# Altium footprint library CHIP-Library.PcbLib: 345 footprints (part 12 of 22)
Each footprint in its own frame and in the unit in brackets; x right, y up, seen from the top. Pads: shape width x height; smd on the part's side, far side on the other; paste and mask are expansions set on the pad; w line width, h text height; cw(c..) or ccw(c..) is an arc to the next point about the centre after c.
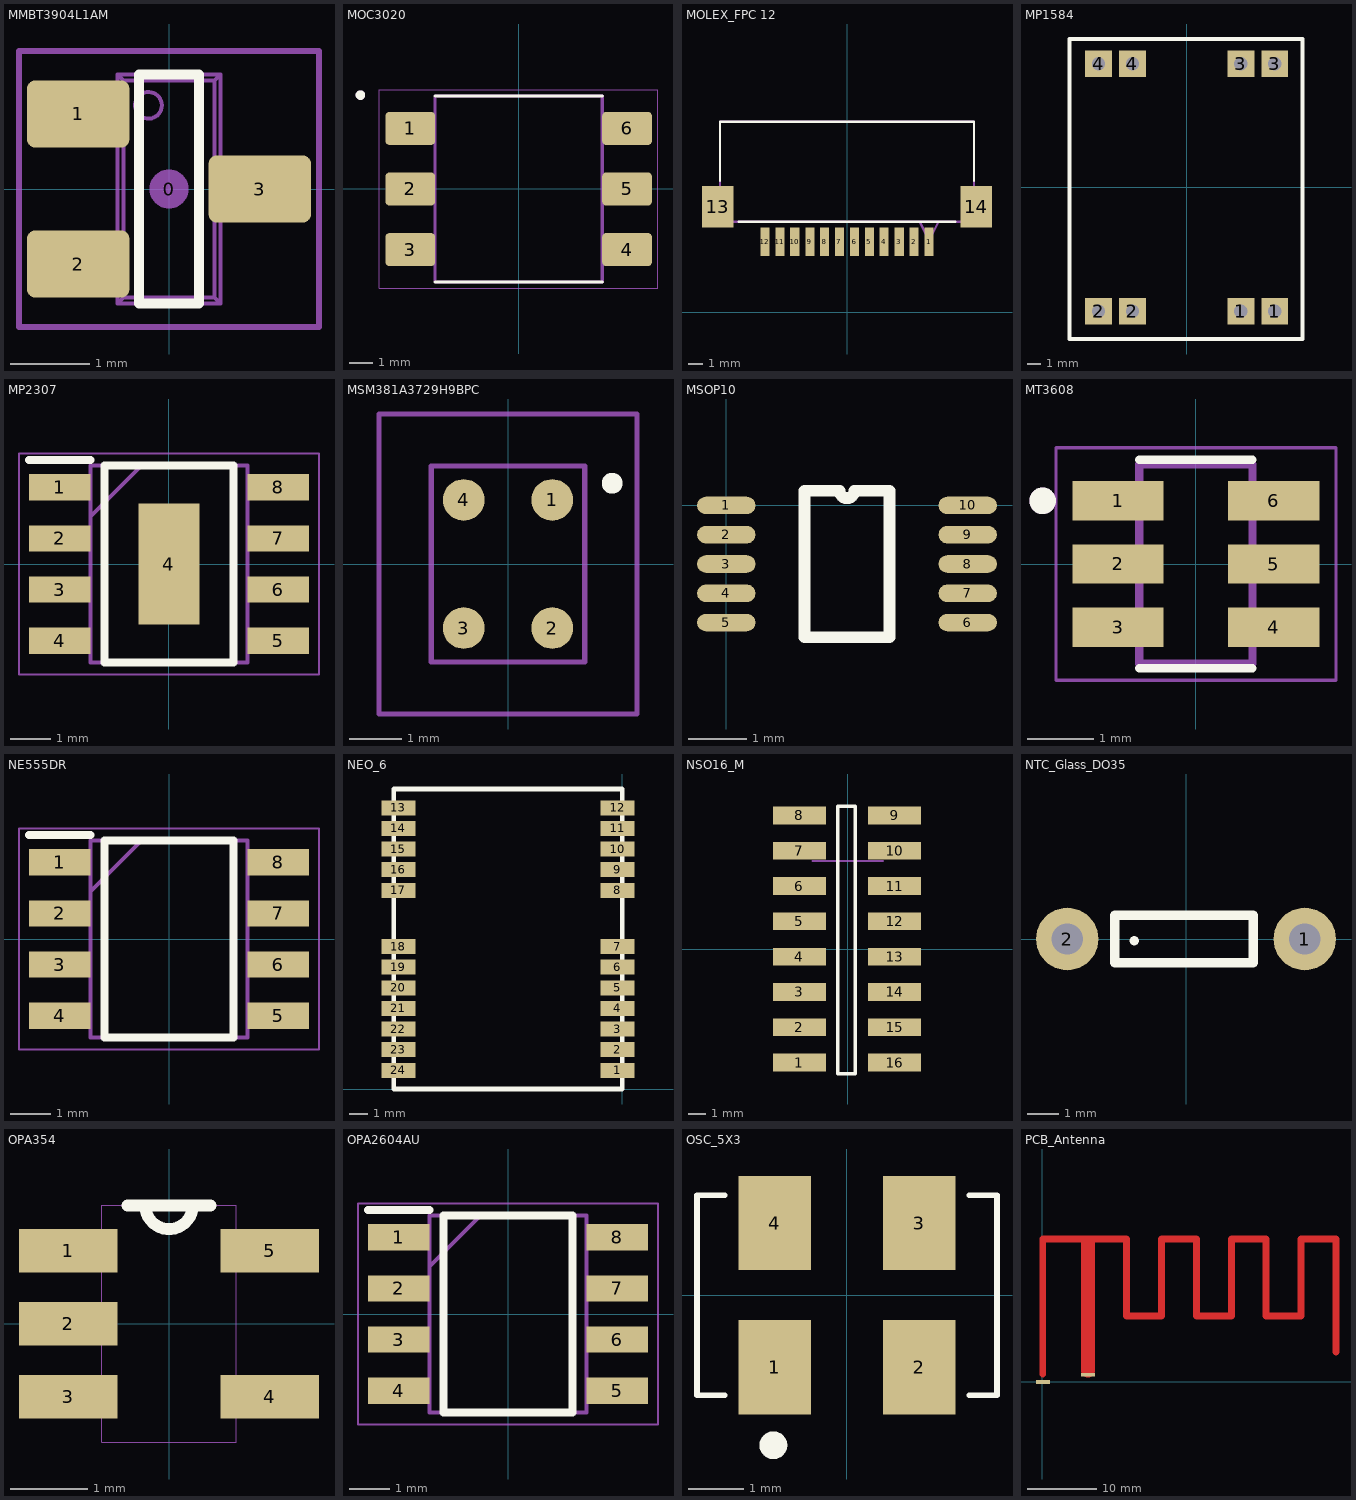
[diagram p11: the footprints below, top view; thin cyan lines are the x and y axes]

## MMBT3904L1AM [mm] "BJT TRANSISTOR SOT23, 3 pin"
height 1.003
pads (4):
  round 0.5 on Mech15: 0(0,0)
  rrect25% 1.3x0.85 smd: 1(-1.15,0.95) 2(-1.15,-0.95) 3(1.15,0)
Top Overlay:
  lines w0.127: -0.381,-1.45 -0.381,1.45 0.381,1.45 0.381,-1.45 -0.381,-1.45
  text "." at -2.125,0.95 h1.4
Mechanical 13:
  circle w0.05: c-0.26,1.06 r0.169
  lines w0.05: -1.19,-1.19 -1.19,-0.71 ; -1.19,0.71 -1.19,1.19 ; -1.099,-1.19 -1.099,-0.71 ; -1.099,0.71 -1.099,1.19 ; -1.074,-1.19 -1.074,-0.71 ; -1.074,0.71 -1.074,1.19 ; -0.825,-1.19 -0.825,-0.71 ; -0.825,0.71 -0.825,1.19 ; -0.65,-1.19 -1.4,-1.19 -1.4,-0.71 -0.65,-0.71 ; -0.65,0.71 -1.4,0.71 -1.4,1.19 -0.65,1.19 ; 0.65,-0.24 1.4,-0.24 1.4,0.24 0.65,0.24 ; 0.825,-0.24 0.825,0.24 ; 1.074,-0.24 1.074,0.24 ; 1.099,-0.24 1.099,0.24 ; 1.19,-0.24 1.19,0.24 ; -0.65,-1.45 0.65,-1.45 ; -0.65,-1.45 -0.65,1.45 ; -0.65,-1.45 -0.576,-1.376 ; -0.65,1.45 -0.576,1.376 ; -0.65,1.45 0.65,1.45 ; -0.576,-1.376 0.576,-1.376 ; -0.576,-1.376 -0.576,1.376 ; -0.576,1.376 0.576,1.376 ; 0.576,-1.376 0.65,-1.45 ; 0.576,-1.376 0.576,1.376 ; 0.576,1.376 0.65,1.45 ; 0.65,-1.45 0.65,1.45
Mechanical 15:
  lines w0.076: -1.9,-1.75 -1.9,1.75 1.9,1.75 1.9,-1.75 -1.9,-1.75
3D body "SOT23-3.STEP": height 1.29, standoff -0.01, extent -1.4,-1.45 1.4,1.45

## MOC3020 [mm]
pads (6):
  rrect25% 2.09x1.39 smd: 1(-4.54,2.54) 2(-4.54,0) 3(-4.54,-2.54) 4(4.54,-2.54) 5(4.54,0) 6(4.54,2.54)
Top Overlay:
  circle w0.2: c-6.63,3.93 r0.1
  lines w0.127: -3.5,-3.9 3.5,-3.9 ; -3.5,3.9 3.5,3.9
Mechanical 13:
  circle w0.2: c-6.63,3.93 r0.1
  lines w0.127: -3.5,-3.9 -3.5,3.9 3.5,3.9 3.5,-3.9 -3.5,-3.9
Mechanical 15:
  lines w0.05: -5.835,-4.15 -5.835,4.15 5.835,4.15 5.835,-4.15 -5.835,-4.15
3D body "IL4118-X009T.STEP": height 4.2, standoff -0.05, extent -4.773,-3.8 5.027,3.8

## MOLEX_FPC 12 [mil]
pads (14):
  rect 24x75 smd: 1(217,185) 2(177,185) 3(138,185) 4(98,185) 5(59,185) 6(20,185) 7(-20,185) 8(-59,185) 9(-98,185) 10(-138,185) 11(-177,185) 12(-217,185)
  rect 83x110 smd: 13(-341,278) 14(341,278)
Top Overlay:
  lines w6: -335,346 -335,502 335,502 335,346 ; -286,238 286,238
Mechanical 4:
  lines w6: -335,238 335,238 ; -335,238 -335,502 ; -335,238 335,238 ; -335,238 -335,502 ; -335,502 335,502 ; -335,502 335,502 ; 217,188 242,238 217,188 ; 217,188 192,238 217,188 ; 335,238 335,502 ; 335,238 335,502

## MP1584 [mm]
height 10.95
pads (8):
  rect 2x2 hole 1: 1(4.064,-9.271) 1(6.604,-9.271) 2(-6.604,-9.271) 2(-4.064,-9.271) 3(4.064,9.271) 3(6.604,9.271) 4(-6.604,9.271) 4(-4.064,9.271)
Top Overlay:
  lines w0.3: -8.788,-11.354 8.687,-11.354 8.687,11.125 -8.788,11.125 -8.788,-11.354
3D body "User Library-PCB_REG.STEP": height 6.26, standoff 2.59, extent -8.551,-11.1 8.449,10.9

## MP2307 [mm] "SOIC8"
pads (9):
  rect 1.525x0.65 smd: 1(-2.712,1.905) 2(-2.712,0.635) 3(-2.712,-0.635) 4(-2.712,-1.905) 5(2.712,-1.905) 6(2.712,-0.635) 7(2.712,0.635) 8(2.712,1.905)
  rect 1.525x3 smd paste-2: 4(0,0)
Top Overlay:
  lines w0.2: -3.475,2.58 -1.95,2.58 ; -1.6,-2.45 -1.6,2.45 1.6,2.45 1.6,-2.45 -1.6,-2.45
Top Paste:
  rectangle: -0.45,0.6 0.45,1.2
  rectangle: -0.45,-1.25 0.45,-0.65
  rectangle: -0.45,-0.3 0.45,0.3
Mechanical 13:
  lines w0.1: -1.95,1.18 -0.68,2.45 ; -1.95,-2.45 -1.95,2.45 1.95,2.45 1.95,-2.45 -1.95,-2.45
Mechanical 15:
  lines w0.05: -3.725,-2.75 -3.725,2.75 3.725,2.75 3.725,-2.75 -3.725,-2.75
3D body "FR9886SOGTR.stp": height 1.75, standoff 0, extent -3,-2.45 3,2.45

## MSM381A3729H9BPC [mm]
pads (4):
  round 0.8 smd: 1(0.85,1.23) 2(0.85,-1.23) 3(-0.85,-1.23) 4(-0.85,1.23)
Top Overlay:
  lines w0.3: 2,1.5 cw(c2,1.55) 2,1.6 cw(c2,1.55) 2,1.5
Mechanical 15:
  lines w0.1: -1.475,-1.88 1.475,-1.88 1.475,1.88 -1.475,1.88 -1.475,-1.88
Mechanical 20:
  lines w0.1: -2.475,-2.88 2.475,-2.88 2.475,2.88 -2.475,2.88 -2.475,-2.88
3D body "MSM381A3729H9BPC.stp": height 1.3, standoff 0, extent -1.475,-1.88 1.475,1.88

## MSOP10 [mm] "MSOP 10 pitch 0.5mm"
pads (10):
  oval 1x0.3 smd: 1(0,0) 2(0,-0.5) 3(0,-1) 4(0,-1.5) 5(0,-2) 6(4.125,-2) 7(4.125,-1.5) 8(4.125,-1) 9(4.125,-0.5) 10(4.125,0)
Top Overlay:
  lines w0.2: 1.335,-2.25 1.335,0.25 1.938,0.25 ccw(c2.063,0.25) 2.187,0.25 2.79,0.25 2.79,-2.25 1.335,-2.25

## MT3608 [mm]
pads (6):
  rect 1.37x0.59 smd: 1(-1.17,0.95) 2(-1.17,0) 3(-1.17,-0.95) 4(1.17,-0.95) 5(1.17,0) 6(1.17,0.95)
Top Overlay:
  circle w0.2: c-2.305,0.95 r0.1
  lines w0.127: -0.85,-1.565 0.85,-1.565 ; -0.85,1.565 0.85,1.565
Mechanical 4:
  circle w0.2: c-2.305,0.95 r0.1
  circle w0.2: c-2.305,0.95 r0.1
  lines w0.127: -0.85,-1.5 -0.85,1.5 ; -0.85,-1.5 0.85,-1.5 ; -0.85,-1.5 -0.85,1.5 ; -0.85,-1.5 0.85,-1.5 ; -0.85,1.5 0.85,1.5 ; -0.85,1.5 0.85,1.5 ; 0.85,-1.5 0.85,1.5 ; 0.85,-1.5 0.85,1.5
Mechanical 16:
  lines w0.05: -2.105,-1.75 -2.105,1.75 2.105,1.75 2.105,-1.75 -2.105,-1.75
3D body "MT3608--3DModel-STEP-56544.STEP": height 1.45, standoff 0, extent -1.4,-1.45 1.4,1.45

## NE555DR [mm]
pads (8):
  rect 1.525x0.65 smd: 1(-2.712,1.905) 2(-2.712,0.635) 3(-2.712,-0.635) 4(-2.712,-1.905) 5(2.712,-1.905) 6(2.712,-0.635) 7(2.712,0.635) 8(2.712,1.905)
Top Overlay:
  lines w0.2: -3.475,2.58 -1.95,2.58 ; -1.6,-2.45 -1.6,2.45 1.6,2.45 1.6,-2.45 -1.6,-2.45
Mechanical 13:
  lines w0.1: -1.95,1.18 -0.68,2.45 ; -1.95,-2.45 -1.95,2.45 1.95,2.45 1.95,-2.45 -1.95,-2.45
Mechanical 15:
  lines w0.05: -3.725,-2.75 -3.725,2.75 3.725,2.75 3.725,-2.75 -3.725,-2.75
3D body "NE555DR.stp": height 1.75, standoff 0, extent -3,-2.45 3,2.45

## NEO_6 [mm]
pads (24):
  rect 1.8x0.8 smd: 1(-0.254,1) 2(-0.254,2.1) 3(-0.254,3.2) 4(-0.254,4.3) 5(-0.254,5.4) 6(-0.254,6.5) 7(-0.254,7.6) 8(-0.254,10.6) 9(-0.254,11.7) 10(-0.254,12.8) 11(-0.254,13.9) 12(-0.254,15) 13(-11.938,15) 14(-11.938,13.9) 15(-11.938,12.8) 16(-11.938,11.7) 17(-11.938,10.6) 18(-11.938,7.6) 19(-11.938,6.5) 20(-11.938,5.4) 21(-11.938,4.3) 22(-11.938,3.2) 23(-11.938,2.1) 24(-11.938,1)
Top Overlay:
  lines w0.254: -12.192,0 0,0 0,16.002 -12.192,16.002 -12.192,0

## NSO16_M [mm] "SOIC, 16-Leads, Body 9.9x3.9mm, Pitch 1.27mm, IPC Low Density"
height 22
pads (16):
  rect 3x1 smd: 1(-2.75,-6.425) 2(-2.75,-4.425) 3(-2.75,-2.425) 4(-2.75,-0.425) 5(-2.75,1.575) 6(-2.75,3.575) 7(-2.75,5.575) 8(-2.75,7.575) 9(2.65,7.575) 10(2.65,5.575) 11(2.65,3.575) 12(2.65,1.575) 13(2.65,-0.425) 14(2.65,-2.425) 15(2.65,-4.425) 16(2.65,-6.425)
Top Overlay:
  lines w0.2: -0.575,-7.05 0.425,-7.05 0.425,8.1 -0.575,8.1 -0.575,-7.05
Mechanical 13:
  lines w0.1: -2,5 2,5

## NTC_Glass_DO35 [mm]
pads (2):
  round 2 hole 1: 1(3.8,0) 2(-3.8,0)
Top Overlay:
  lines w0.305: -2.286,-0.762 -2.286,0.762 2.159,0.762 2.159,-0.762 -2.286,-0.762 ; -1.651,-0.063 -1.651,-0.063
3D body "User Library-DO-35_300mils.STEP": height 2.46, standoff -2, extent -4.07,-1.016 4.07,0.89

## OPA354 [mil]
pads (5):
  rect 50x22 smd: 1(-51,37) 2(-51,0) 3(-51,-37) 4(51,-37) 5(51,37)
Top Overlay:
  lines w6: -21,60 -12,60 ; 21,60 12,60 ; -12,60 ccw(c0,60) 12,60 ; -12,60 12,60
Mechanical 4:
  lines w0: -59,-47 -59,-28 ; -59,-47 -34,-47 ; -59,-47 -59,-28 ; -59,-47 -34,-47 ; -59,-28 -34,-28 ; -59,-28 -34,-28 ; -59,-10 -59,10 ; -59,-10 -34,-10 ; -59,-10 -59,10 ; -59,-10 -34,-10 ; -59,10 -34,10 ; -59,10 -34,10 ; -59,28 -59,47 ; -59,28 -34,28 ; -59,28 -59,47 ; -59,28 -34,28 ; -59,47 -34,47 ; -59,47 -34,47 ; -34,-60 34,-60 ; -34,-60 -34,-47 ; -34,-60 34,-60 ; -34,-60 -34,-47 ; -34,-47 -34,-28 ; -34,-47 -34,-28 ; -34,-28 -34,-10 ; -34,-28 -34,-10 ; -34,-10 -34,10 ; -34,-10 -34,10 ; -34,10 -34,28 ; -34,10 -34,28 ; -34,28 -34,47 ; -34,28 -34,47 ; -34,47 -34,60 ; -34,47 -34,60 ; -34,60 -12,60 ; -34,60 -12,60 ; -12,60 ccw(c0,60) 12,60 ; -12,60 ccw(c0,60) 12,60 ; -12,60 12,60 ; -12,60 12,60 ; 12,60 34,60 ; 12,60 34,60 ; 34,-60 34,-47 ; 34,-60 34,-47 ; 34,-47 34,-28 ; 34,-47 59,-47 ; 34,-47 34,-28 ; 34,-47 59,-47 ; 34,-28 34,28 ; 34,-28 59,-28 ; 34,-28 34,28 ; 34,-28 59,-28 ; 34,28 34,47 ; 34,28 59,28 ; 34,28 34,47 ; 34,28 59,28 ; 34,47 34,60 ; 34,47 59,47 ; 34,47 34,60 ; 34,47 59,47 ; 59,-47 59,-28 ; 59,-47 59,-28 ; 59,28 59,47 ; 59,28 59,47
3D body "TPS73225DBVR--3DModel-STEP-56544.STEP": height 56.12, standoff -1.01, extent -55.13,-57.1 55.12,57.08

## OPA2604AU [mm]
pads (8):
  rect 1.525x0.65 smd: 1(-2.712,1.905) 2(-2.712,0.635) 3(-2.712,-0.635) 4(-2.712,-1.905) 5(2.712,-1.905) 6(2.712,-0.635) 7(2.712,0.635) 8(2.712,1.905)
Top Overlay:
  lines w0.2: -3.475,2.58 -1.95,2.58 ; -1.6,-2.45 -1.6,2.45 1.6,2.45 1.6,-2.45 -1.6,-2.45
Mechanical 13:
  lines w0.1: -1.95,1.18 -0.68,2.45 ; -1.95,-2.45 -1.95,2.45 1.95,2.45 1.95,-2.45 -1.95,-2.45
Mechanical 15:
  lines w0.05: -3.725,-2.75 -3.725,2.75 3.725,2.75 3.725,-2.75 -3.725,-2.75
3D body "FR9886SOGTR.stp": height 1.75, standoff 0, extent -3,-2.45 3,2.45

## OSC_5X3 [mm]
pads (4):
  rect 1.3x1.7 smd mask+0.15: 1(-1.3,-1.3) 2(1.3,-1.3) 3(1.3,1.3) 4(-1.3,1.3)
Top Overlay:
  circle w0.25: c-1.325,-2.7 r0.125
  lines w0.1: -2.2,-1.8 -2.7,-1.8 -2.7,1.8 -2.2,1.8 ; 2.2,-1.8 2.7,-1.8 2.7,1.8 2.2,1.8
3D body: height 1.4, standoff 0, extent -2.575,-1.675 2.575,1.675

## PCB_Antenna [mil]
pads (2):
  rect 78x21 smd: 1(260,40) 2(5,0)
Top Layer:
  lines w39.37: 4.09,45 4.09,805.61 263.62,805.61 476.54,805.61 476.54,372.54 673.39,372.54 673.39,805.61 870.24,805.61 870.24,372.54 1067.09,372.54 1067.09,805.61 1263.94,805.61 1263.94,372.54 1460.79,372.54 1460.79,805.61 1657.64,805.61 1657.64,170
  lines w78.74: 260,65 260,781.79